# Altium footprint library bs_libs.PcbLib: 125 footprints (part 3 of 8)
Each footprint in its own frame and in the unit in brackets; x right, y up, seen from the top. Pads: shape width x height; smd on the part's side, far side on the other; paste and mask are expansions set on the pad; w line width, h text height; cw(c..) or ccw(c..) is an arc to the next point about the centre after c.
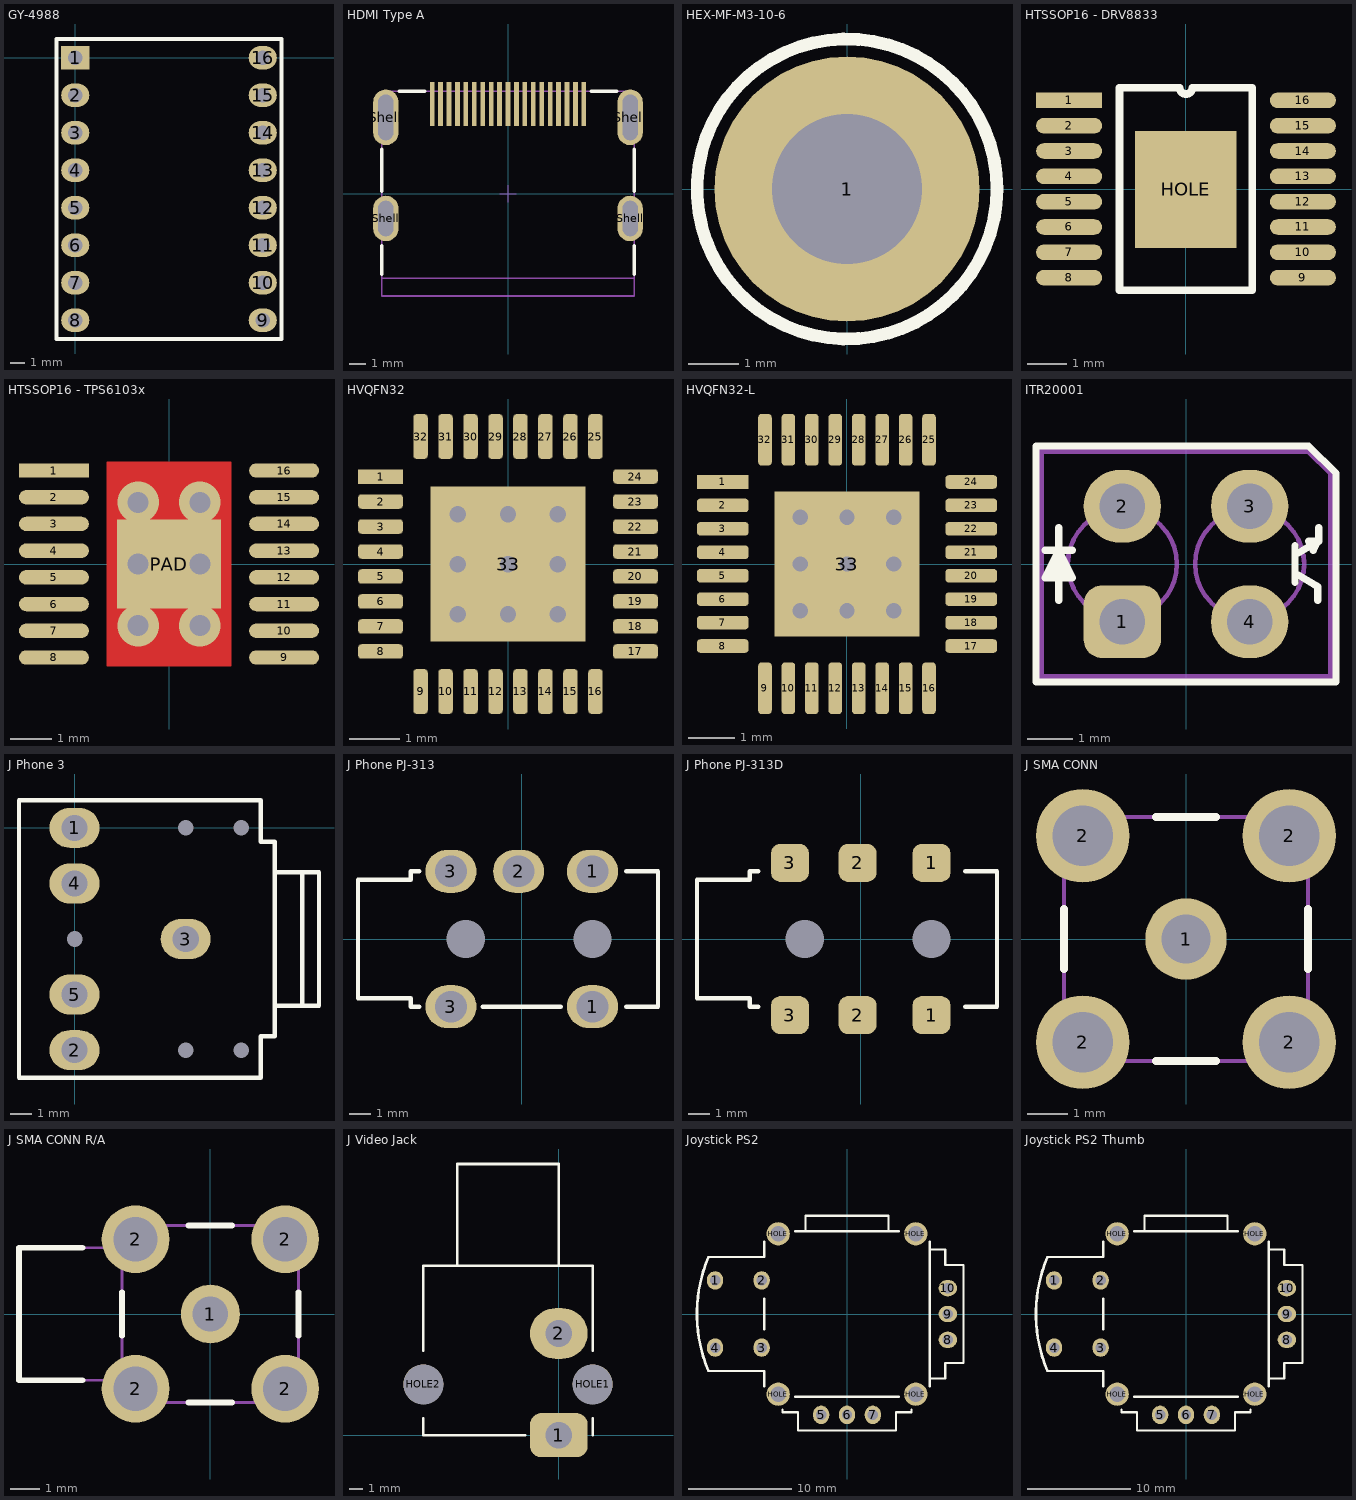
[diagram p2: the footprints below, top view; thin cyan lines are the x and y axes]

## GY-4988 [mil] "Step motor driver"
height 472.44
pads (16):
  rect 75x62 hole 39: 1(0,0)
  oval 75x62 hole 39: 2(0,-100) 3(0,-200) 4(0,-300) 5(0,-400) 6(0,-500) 7(0,-600) 8(0,-700) 9(500,-700) 10(500,-600) 11(500,-500) 12(500,-400) 13(500,-300) 14(500,-200) 15(500,-100) 16(500,0)
Top Overlay:
  lines w10: -50,-750 550,-750 550,50 -50,50 -50,-750

## HDMI Type A [mm] "HDMI SMT Horizontal"
height 6.13
pads (23):
  rect 0.28x2.6 smd: 1(4.5,5.325) 2(4,5.325) 3(3.5,5.325) 4(3,5.325) 5(2.5,5.325) 6(2,5.325) 7(1.5,5.325) 8(1,5.325) 9(0.5,5.325) 10(0,5.325) 11(-0.5,5.325) 12(-1,5.325) 13(-1.5,5.325) 14(-2,5.325) 15(-2.5,5.325) 16(-3,5.325) 17(-3.5,5.325) 18(-4,5.325) 19(-4.5,5.325)
  oval 1.5x2.7 hole 0.9 slot 2.1 at 90 deg: Shell(-7.25,-1.475) Shell(7.25,-1.475)
  oval 1.5x3.3 hole 0.9 slot 2.7 at 90 deg: Shell(-7.25,4.525) Shell(7.25,4.525)
Top Overlay:
  lines w0.2: -7.5,-4.775 -7.5,-3.075 ; -7.5,0.125 -7.5,2.625 ; -6.45,6.075 -4.95,6.075 ; 4.95,6.075 6.45,6.075 ; 7.5,-4.775 7.5,-3.075 ; 7.5,0.125 7.5,2.625
Mechanical 2:
  lines w0.1: -7.5,-5.025 7.5,-5.025
  text "PCB Edge" at -1.989,-5.88 h0.89
Mechanical 13:
  lines w0.1: 7.5,6.075 7.5,-6.075 -7.5,-6.075 -7.5,6.075 7.5,6.075
Mechanical 15:
  lines w0.05: -0.5,0 0.5,0 ; 0,-0.5 0,0.5
3D body "685119134923.stp": height 6.17, standoff -2.2, extent -7.55,-6.075 7.45,6.075

## HEX-MF-M3-10-6 [mm]
pads (1):
  round 5.3 hole 3: 1(0,0)
Top Overlay:
  circle w0.254: c0,0 r3
3D body "HEX-MF-M3-10-6.step": height 10, standoff -6, extent -2.675,-2.35 2.675,2.35

## HTSSOP16 - DRV8833 [mm]
pads (17):
  rect 1.7x0.4 smd: 1(-3,2.275)
  oval 1.7x0.4 smd: 2(-3,1.625) 3(-3,0.975) 4(-3,0.325) 5(-3,-0.325) 6(-3,-0.975) 7(-3,-1.625) 8(-3,-2.275) 9(3,-2.275) 10(3,-1.625) 11(3,-0.975) 12(3,-0.325) 13(3,0.325) 14(3,0.975) 15(3,1.625) 16(3,2.275)
  rect 2.6x3 smd: HOLE(-0.003,-0.011)
Top Overlay:
  lines w0.2: -1.705,-2.6 -1.705,2.6 -0.162,2.6 ccw(c0,2.6) 0.162,2.6 1.699,2.6 1.699,-2.6 -1.705,-2.6
3D body "User Library-TSSOP-16-1.step": height 1.1, standoff 0, extent -3.2,-2.5 3.2,2.5

## HTSSOP16 - TPS6103x [mm]
pads (17):
  rect 1.7x0.35 smd: 1(-2.8,2.275)
  oval 1.7x0.35 smd: 2(-2.8,1.625) 3(-2.8,0.975) 4(-2.8,0.325) 5(-2.8,-0.325) 6(-2.8,-0.975) 7(-2.8,-1.625) 8(-2.8,-2.275) 9(2.8,-2.275) 10(2.8,-1.625) 11(2.8,-0.975) 12(2.8,-0.325) 13(2.8,0.325) 14(2.8,0.975) 15(2.8,1.625) 16(2.8,2.275)
  rect 2.54x2.159 smd: PAD(0,0)
via 0.75,1.5 diameter 1.016 hole 0.508
via -0.75,1.5 diameter 1.016 hole 0.508
via 0.75,-1.5 diameter 1.016 hole 0.508
via -0.75,-1.5 diameter 1.016 hole 0.508
via -0.75,0 diameter 1.016 hole 0.508
via 0.75,0 diameter 1.016 hole 0.508
Top Layer:
  rectangle: -1.524,-2.5 1.524,2.5
3D body "User Library-TSSOP-16-1.step": height 1.1, standoff 0, extent -3.197,-2.489 3.203,2.511

## HVQFN32 [mm]
pads (33):
  rect 0.9x0.29 smd: 1(-2.55,1.75)
  rrect50% 0.9x0.29 smd: 2(-2.55,1.25) 3(-2.55,0.75) 4(-2.55,0.25) 5(-2.55,-0.25) 6(-2.55,-0.75) 7(-2.55,-1.25) 8(-2.55,-1.75) 17(2.55,-1.75) 18(2.55,-1.25) 19(2.55,-0.75) 20(2.55,-0.25) 21(2.55,0.25) 22(2.55,0.75) 23(2.55,1.25) 24(2.55,1.75)
  rrect50% 0.29x0.9 smd: 9(-1.75,-2.55) 10(-1.25,-2.55) 11(-0.75,-2.55) 12(-0.25,-2.55) 13(0.25,-2.55) 14(0.75,-2.55) 15(1.25,-2.55) 16(1.75,-2.55) 25(1.75,2.55) 26(1.25,2.55) 27(0.75,2.55) 28(0.25,2.55) 29(-0.25,2.55) 30(-0.75,2.55) 31(-1.25,2.55) 32(-1.75,2.55)
  rect 3.1x3.1 smd: 33(0,0)
via 1,1 diameter 0.66 hole 0.33
via 0,1 diameter 0.66 hole 0.33
via -1,1 diameter 0.66 hole 0.33
via -1,0 diameter 0.66 hole 0.33
via -1,-1 diameter 0.66 hole 0.33
via 0,-1 diameter 0.66 hole 0.33
via 1,-1 diameter 0.66 hole 0.33
via 1,0 diameter 0.66 hole 0.33
via 0,0 diameter 0.66 hole 0.33
3D body "User Library-QFN32 (FTDI).STEP": height 0.8, standoff -0.05, extent -2.5,-2.5 2.5,2.5

## HVQFN32-L [mm]
pads (33):
  rect 1.1x0.29 smd: 1(-2.65,1.75)
  rrect50% 1.1x0.29 smd: 2(-2.65,1.25) 3(-2.65,0.75) 4(-2.65,0.25) 5(-2.65,-0.25) 6(-2.65,-0.75) 7(-2.65,-1.25) 8(-2.65,-1.75) 17(2.65,-1.75) 18(2.65,-1.25) 19(2.65,-0.75) 20(2.65,-0.25) 21(2.65,0.25) 22(2.65,0.75) 23(2.65,1.25) 24(2.65,1.75)
  rrect50% 0.29x1.1 smd: 9(-1.75,-2.65) 10(-1.25,-2.65) 11(-0.75,-2.65) 12(-0.25,-2.65) 13(0.25,-2.65) 14(0.75,-2.65) 15(1.25,-2.65) 16(1.75,-2.65) 25(1.75,2.65) 26(1.25,2.65) 27(0.75,2.65) 28(0.25,2.65) 29(-0.25,2.65) 30(-0.75,2.65) 31(-1.25,2.65) 32(-1.75,2.65)
  rect 3.1x3.1 smd: 33(0,0)
via 0,0 diameter 0.66 hole 0.33
via 1,0 diameter 0.66 hole 0.33
via 1,-1 diameter 0.66 hole 0.33
via 0,-1 diameter 0.66 hole 0.33
via -1,-1 diameter 0.66 hole 0.33
via -1,0 diameter 0.66 hole 0.33
via -1,1 diameter 0.66 hole 0.33
via 0,1 diameter 0.66 hole 0.33
via 1,1 diameter 0.66 hole 0.33
3D body "User Library-QFN32 (FTDI).STEP": height 0.8, standoff -0.05, extent -2.5,-2.5 2.5,2.5

## ITR20001 [mm]
pads (4):
  rrect50% 1.7x1.6 hole 1: 1(-1.4,-1.27)
  oval 1.7x1.6 hole 1: 2(-1.4,1.27) 3(1.4,1.27) 4(1.4,-1.27)
Top Overlay:
  lines w0.152: -3.3,-2.6 3.3,-2.6 3.3,2 2.7,2.6 -3.3,2.6 -3.3,-2.6
  lines w0.16: -3.1,0.3 -2.5,0.3 ; -3,-0.3 -2.8,0 -2.6,-0.3 ; -2.8,-0.8 -2.8,0.8 ; 2.4,-0.4 2.4,0.4 ; 2.4,-0.2 2.9,-0.5 2.9,-0.8 ; 2.4,0.2 2.9,0.5 ; 2.7,0.5 2.9,0.5 ; 2.8,0.3 2.9,0.5 ; 2.92,0.5 2.92,0.8 ; -3.1,-0.3 -2.5,-0.3 -2.8,0.3 -3.1,-0.3
Mechanical 1:
  circle w0.1: c-1.4,0 r1.2
  circle w0.1: c1.4,0 r1.2
  lines w0.152: -3.2,-2.5 -3.2,2.5 2.7,2.5 3.2,2 3.2,-2.5 -3.2,-2.5
3D body: height 1.27, standoff -1.27, extent -1.778,-1.63 -1.019,-0.87
3D body: height 1.27, standoff -1.27, extent 1.022,-1.63 1.781,-0.87
3D body: height 1.27, standoff -1.27, extent 1.022,0.87 1.781,1.63
3D body: height 1.27, standoff -1.27, extent -1.778,0.87 -1.019,1.63
3D body: height 6.5, standoff 0, extent -3.2,0 3.2,2.5
3D body: height 6.5, standoff 0, extent -3.2,-2.5 3.2,0
3D body: height 6.5, standoff 4.1, extent 0.2,-1.197 2.6,1.197
3D body: height 6.5, standoff 4.1, extent -2.6,-1.197 -0.2,1.197
3D body: height 4.1, standoff 0, extent -3.2,-2.5 3.2,2.5

## J Phone 3 [mil] "Jack Phone 3-pole 5-pin"
pads (10):
  oval 90x72 hole 47.24: 1(0,0) 2(0,-400) 3(200,-200) 4(0,-100) 5(0,-300)
  round 0 hole 28: H1(0,-200) H1(200,-400) H1(200,0) H1(300,-400) H1(300,0)
Top Overlay:
  lines w8: 360,-320 440,-320 440,-80 360,-80 ; 410,-320 410,-80 ; -100,-450 -100,50 335,50 335,-25 360,-25 360,-375 335,-375 335,-450 -100,-450
3D body "User Library-CONNECTOR  PHONE JACK  STEREO  3_5 MM  SEE-PLUS ST-3536-02HG.step": height 413.78, standoff -117.72, extent -105.12,-436.22 450,36.22

## J Phone PJ-313 [mm] "Jack Phone 3-pole 5-pin"
pads (7):
  oval 2.413x2.032 hole 1.5: 1(3.35,-3.2) 1(3.35,3.2) 2(-0.15,3.2) 3(-3.35,-3.2) 3(-3.35,3.2)
  round 0 hole 1.8: HOLE(-2.65,0) HOLE(3.35,0)
Top Overlay:
  lines w0.203: -4.85,-3.2 -5.25,-3.2 -5.25,-2.8 -7.75,-2.8 -7.75,2.8 -5.25,2.8 -5.25,3.2 -4.85,3.2 ; -1.85,-3.2 1.85,-3.2 ; 4.95,-3.2 6.45,-3.2 6.45,3.2 4.95,3.2
3D body: height 5.64, standoff 4.35, extent -4,-3.6 -2.7,-2.303
3D body: height 5.64, standoff 4.35, extent 2.7,-3.6 4,-2.303
3D body: height 5.64, standoff 4.35, extent 2.7,2.303 4,3.6
3D body: height 5.64, standoff 4.35, extent -0.8,2.303 0.5,3.6
3D body: height 5.64, standoff 4.35, extent -4,2.303 -2.7,3.6
3D body: height 6, standoff 0, extent -5.15,-3.1 6.35,3.1
3D body: height 5.58, standoff 0.2, extent -7.65,-2.695 -5.15,2.695
3D body: height 5, standoff -1, extent -4,2.8 -2.7,3.6
3D body: height 5, standoff -1, extent -0.8,2.8 0.5,3.6
3D body: height 5, standoff -1, extent 2.7,2.8 4,3.6
3D body: height 5, standoff -1, extent 2.7,-3.6 4,-2.8
3D body: height 5, standoff -1, extent -4,-3.6 -2.7,-2.8

## J Phone PJ-313D [mm] "Jack Phone 3-pole 5-pin"
pads (8):
  rrect50% 1.8x1.8 smd: 1(3.35,-3.6) 1(3.35,3.6) 2(-0.15,-3.6) 2(-0.15,3.6) 3(-3.35,-3.6) 3(-3.35,3.6)
  round 0 hole 1.8: HOLE(-2.65,0) HOLE(3.35,0)
Top Overlay:
  lines w0.203: -4.85,-3.2 -5.25,-3.2 -5.25,-2.8 -7.75,-2.8 -7.75,2.8 -5.25,2.8 -5.25,3.2 -4.85,3.2 ; 4.95,-3.2 6.45,-3.2 6.45,3.2 4.95,3.2
3D body: height 5.58, standoff 0.2, extent -7.65,-2.695 -5.15,2.695
3D body: height 6, standoff 0, extent -5.15,-3.1 6.35,3.1

## J SMA CONN [mm] "Connector; RF Coaxial, MCX, Thru-Hole; 5 Position; Right Angle"
height 5.99
pads (5):
  round 2 hole 1.2: 1(0,0)
  round 2.3 hole 1.5: 2(-2.54,-2.54) 2(-2.54,2.54) 2(2.54,-2.54) 2(2.54,2.54)
Top Overlay:
  lines w0.2: -3,-0.74 -3,0.74 ; -0.74,-3 0.74,-3 ; -0.74,3 0.74,3 ; 3,-0.74 3,0.74
Mechanical 13:
  lines w0.1: -3,-3 -3,3 3,3 3,-3 -3,-3
3D body "User Library-SMA_Stehend_Amp 132134RP-1.STEP": height 9.53, standoff -3.94, extent -3.444,-3.5 3.556,3.5

## J SMA CONN R/A [mm] "Connector; RF Coaxial, MCX, Thru-Hole; 5 Position; Right Angle"
height 5.99
pads (5):
  round 2 hole 1.2: 1(0,0)
  round 2.3 hole 1.5: 2(-2.54,-2.54) 2(-2.54,2.54) 2(2.54,-2.54) 2(2.54,2.54)
Top Overlay:
  lines w0.2: -4.34,-2.25 -6.5,-2.25 -6.5,2.25 -4.34,2.25 ; -3,-0.74 -3,0.74 ; -0.74,-3 0.74,-3 ; -0.74,3 0.74,3 ; 3,-0.74 3,0.74
Mechanical 13:
  lines w0.1: -3,-2.25 -6.5,-2.25 -6.5,2.25 -3,2.25 ; -3,-3 -3,3 3,3 3,-3 -3,-3
3D body "User Library-919-119J-51AX.step": height 5.9, standoff -3.94, extent -6.5,-3 3,3

## J Video Jack [mil] "CFC UBEC 5V/3A Switching Module"
pads (4):
  rrect50% 170x130 hole 79: 1(0,0)
  oval 170x150 hole 79: 2(0,300)
  round 118 hole 118: HOLE1(100,150) HOLE2(-400,150)
Top Overlay:
  lines w8: -400,50 -400,0 -100,0 ; -400,250 -400,500 100,500 100,250 ; -300,500 -300,800 0,800 0,500 ; 100,0 100,50
3D body "User Library-Tulip Jack (W R Y).step": height 472.44, standoff -196.85, extent -346.85,50 46.85,813.78

## Joystick PS2 [mm]
pads (14):
  oval 1.575x1.778 hole 1: 1(-12.75,3.25) 2(-8.25,3.25) 3(-8.25,-3.25) 4(-12.75,-3.25) 5(-2.5,-9.75) 6(0,-9.75) 7(2.5,-9.75)
  oval 1.778x1.575 hole 1: 8(9.75,-2.5) 9(9.75,0) 10(9.75,2.5)
  round 2.246 hole 1.5: HOLE(-6.65,-7.75) HOLE(-6.65,7.75) HOLE(6.65,-7.75) HOLE(6.65,7.75)
Top Overlay:
  lines w0.203: -13.428,-5.5 -8,-5.5 -8,-7 ; -13.428,5.5 -8,5.5 -8,7 ; -8,-1.5 -8,1.5 ; -6.25,-9.25 -6.25,-9.5 -4.75,-9.5 -4.75,-11.25 4.75,-11.25 4.75,-9.5 6.25,-9.5 6.25,-9.25 ; -5,-8 5,-8 ; -5,8 5,8 ; -4,8 -4,9.5 4,9.5 4,8 ; 8,-7 8,7 ; 8,-6.25 9.5,-6.25 9.5,-4.75 11.25,-4.75 11.25,4.75 9.5,4.75 9.5,6.25 8,6.25
  lines w0.254: -13.428,-5.471 cw(c0,0) -13.428,5.471
3D body "User Library-alps joystick module.step": height 19, standoff -4.3, extent -16.026,-11.85 11.85,9.45

## Joystick PS2 Thumb [mm]
pads (14):
  oval 1.575x1.778 hole 1: 1(-12.75,3.25) 2(-8.25,3.25) 3(-8.25,-3.25) 4(-12.75,-3.25) 5(-2.5,-9.75) 6(0,-9.75) 7(2.5,-9.75)
  oval 1.778x1.575 hole 1: 8(9.75,-2.5) 9(9.75,0) 10(9.75,2.5)
  round 2.246 hole 1.5: HOLE(-6.65,-7.75) HOLE(-6.65,7.75) HOLE(6.65,-7.75) HOLE(6.65,7.75)
Top Overlay:
  lines w0.203: -13.428,-5.5 -8,-5.5 -8,-7 ; -13.428,5.5 -8,5.5 -8,7 ; -8,-1.5 -8,1.5 ; -6.25,-9.25 -6.25,-9.5 -4.75,-9.5 -4.75,-11.25 4.75,-11.25 4.75,-9.5 6.25,-9.5 6.25,-9.25 ; -5,-8 5,-8 ; -5,8 5,8 ; -4,8 -4,9.5 4,9.5 4,8 ; 8,-7 8,7 ; 8,-6.25 9.5,-6.25 9.5,-4.75 11.25,-4.75 11.25,4.75 9.5,4.75 9.5,6.25 8,6.25
  lines w0.254: -13.428,-5.471 cw(c0,0) -13.428,5.471
3D body "User Library-Joystick_Asm_Left.STEP": height 28.61, standoff -3, extent -15.042,-13.222 13.169,13.076